# Altium integrated library SS12D07VG4.IntLib: 1 symbol
Pins are listed as number, name and electrical type; pins without a type are passive.

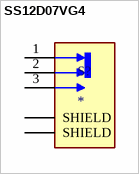
[diagram p0: symbol SS12D07VG4]

## SS12D07VG4
designator S?
Switch Slide ON ON SPDT Top Slide 0.3A 30VDC PC Pins Bracket Mount/Through Hole Automotive Bulk; MF: Shouhan; MP: SS12D07VG4; SnapEDA_Link: https://www.snapeda.com/parts/SS12D07VG4/Shouhan/view-part/?ref=snap; Package: Package; Value: *; Check_prices: https://www.snapeda.com/parts/SS12D07VG4/Shouhan/view-part/?ref=eda
footprint SW_SS12D07VG4
pins: 1, 2, 3, S1 SHIELD, S2 SHIELD